# Altium footprint library HCTL_PM127-2-08-S-4.3.PcbLib: 1 footprints
Each footprint in its own frame and in the unit in brackets; x right, y up, seen from the top. Pads: shape width x height; smd on the part's side, far side on the other; paste and mask are expansions set on the pad; w line width, h text height; cw(c..) or ccw(c..) is an arc to the next point about the centre after c.
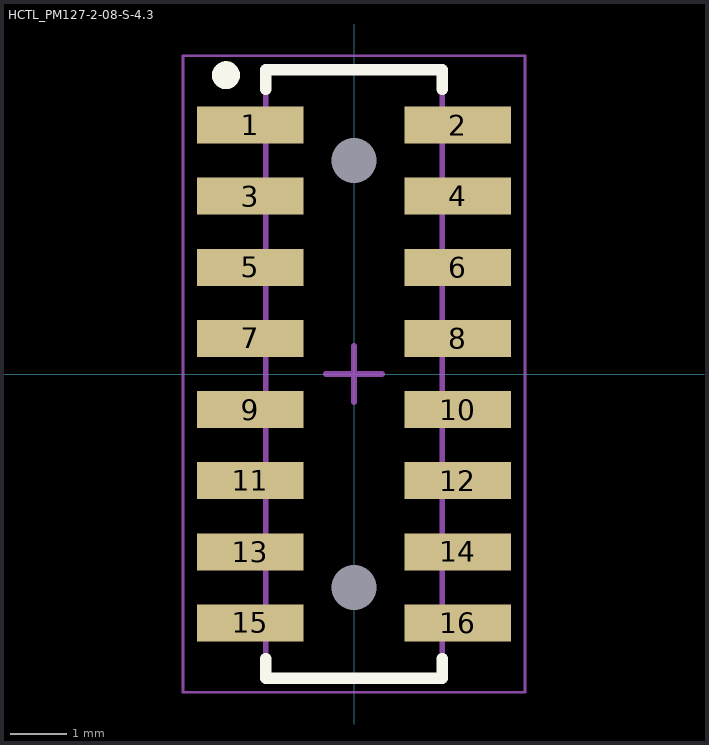
[diagram p0: the footprint, top view; thin cyan lines are the x and y axes]

## HCTL_PM127-2-08-S-4.3 [mm]
height 4.8
pads (18):
  rect 1.9x0.66 smd: 1(-1.85,4.445) 2(1.85,4.445) 3(-1.85,3.175) 4(1.85,3.175) 5(-1.85,1.905) 6(1.85,1.905) 7(-1.85,0.635) 8(1.85,0.635) 9(-1.85,-0.635) 10(1.85,-0.635) 11(-1.85,-1.905) 12(1.85,-1.905) 13(-1.85,-3.175) 14(1.85,-3.175) 15(-1.85,-4.445) 16(1.85,-4.445)
  round 0 hole 0.8 unplated: ""(0,-3.81) ""(0,3.81)
Top Overlay:
  circle w0.25: c-2.286,5.334 r0.125
  lines w0.2: -1.575,-5.08 -1.575,-5.43 1.575,-5.43 1.575,-5.08 ; -1.575,5.08 -1.575,5.43 1.575,5.43 1.575,5.08
Mechanical 13:
  lines w0.1: -1.575,-5.43 1.575,-5.43 1.575,5.43 -1.575,5.43 -1.575,-5.43
Mechanical 15:
  lines w0.05: -3.05,-5.68 -3.05,5.68 3.05,5.68 3.05,-5.68 -3.05,-5.68
  lines w0.1: -0.5,0 0.5,0 ; 0,-0.5 0,0.5
3D body "HCTL_PM127-2-08-S-4.3.stp": height 3.61, standoff 0.01, extent -2.25,-5.255 2.25,5.255